# Altium footprint library Module.PcbLib: 20 footprints (part 2 of 2)
Each footprint in its own frame and in the unit in brackets; x right, y up, seen from the top. Pads: shape width x height; smd on the part's side, far side on the other; paste and mask are expansions set on the pad; w line width, h text height; cw(c..) or ccw(c..) is an arc to the next point about the centre after c.
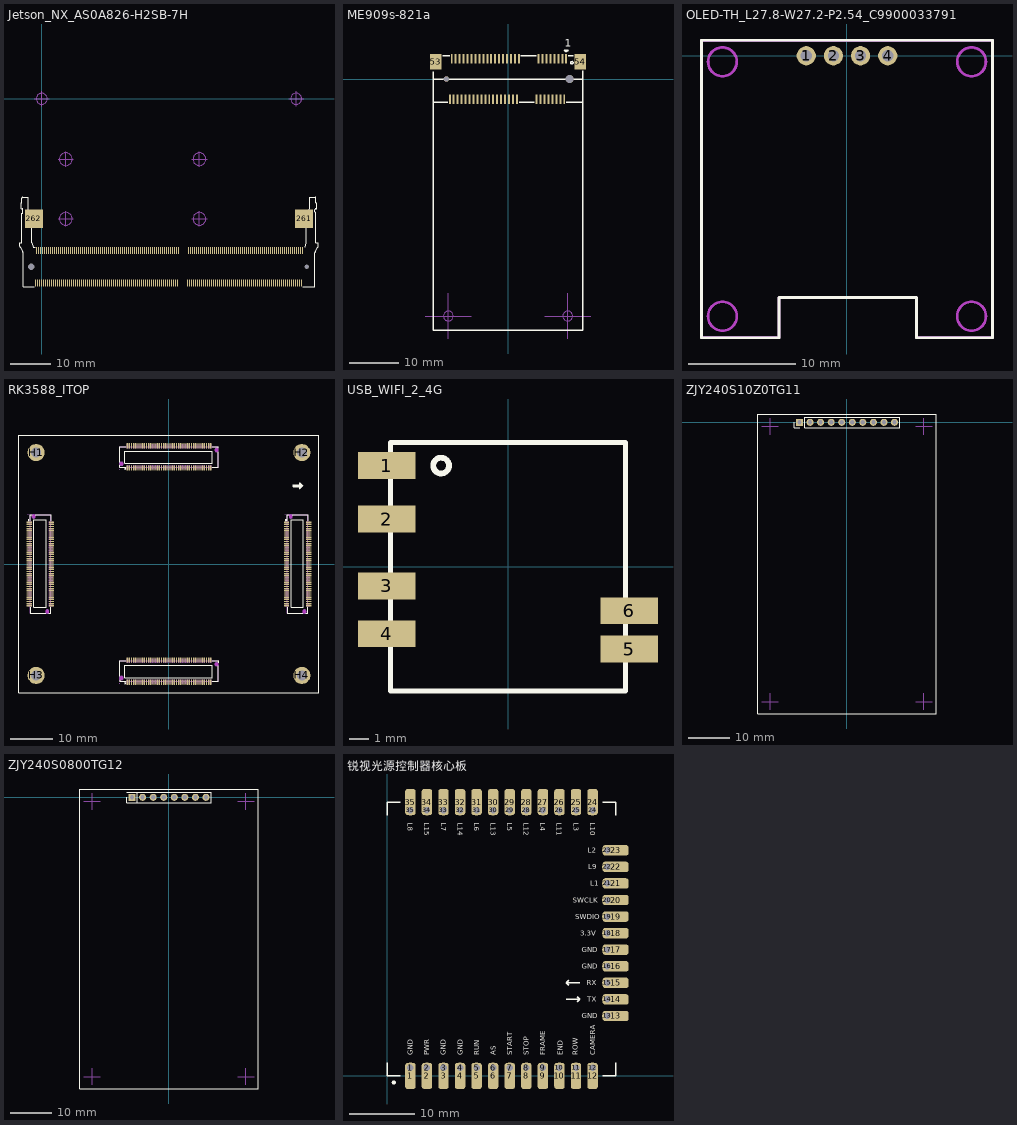
[diagram p1: the footprints below, top view; thin cyan lines are the x and y axes]

## Jetson_NX_AS0A826-H2SB-7H [mm]
pads (264):
  rect 0.3x1.75 smd paste-0.05: 1(-1.575,-46.1) 2(-1.325,-37.9) 3(-1.075,-46.1) 4(-0.825,-37.9) 5(-0.575,-46.1) 6(-0.325,-37.9) 7(-0.075,-46.1) 8(0.175,-37.9) 9(0.425,-46.1) 10(0.675,-37.9) 11(0.925,-46.1) 12(1.175,-37.9) 13(1.425,-46.1) 14(1.675,-37.9) 15(1.925,-46.1) 16(2.175,-37.9) 17(2.425,-46.1) 18(2.675,-37.9) 19(2.925,-46.1) 20(3.175,-37.9) 21(3.425,-46.1) 22(3.675,-37.9) 23(3.925,-46.1) 24(4.175,-37.9) 25(4.425,-46.1) 26(4.675,-37.9) 27(4.925,-46.1) 28(5.175,-37.9) 29(5.425,-46.1) 30(5.675,-37.9) 31(5.925,-46.1) 32(6.175,-37.9) 33(6.425,-46.1) 34(6.675,-37.9) 35(6.925,-46.1) 36(7.175,-37.9) 37(7.425,-46.1) 38(7.675,-37.9) 39(7.925,-46.1) 40(8.175,-37.9) 41(8.425,-46.1) 42(8.675,-37.9) 43(8.925,-46.1) 44(9.175,-37.9) 45(9.425,-46.1) 46(9.675,-37.9) 47(9.925,-46.1) 48(10.175,-37.9) 49(10.425,-46.1) 50(10.675,-37.9) 51(10.925,-46.1) 52(11.175,-37.9) 53(11.425,-46.1) 54(11.675,-37.9) 55(11.925,-46.1) 56(12.175,-37.9) 57(12.425,-46.1) 58(12.675,-37.9) 59(12.925,-46.1) 60(13.175,-37.9) 61(13.425,-46.1) 62(13.675,-37.9) 63(13.925,-46.1) 64(14.175,-37.9) 65(14.425,-46.1) 66(14.675,-37.9) 67(14.925,-46.1) 68(15.175,-37.9) 69(15.425,-46.1) 70(15.675,-37.9) 71(15.925,-46.1) 72(16.175,-37.9) 73(16.425,-46.1) 74(16.675,-37.9) 75(16.925,-46.1) 76(17.175,-37.9) 77(17.425,-46.1) 78(17.675,-37.9) 79(17.925,-46.1) 80(18.175,-37.9) 81(18.425,-46.1) 82(18.675,-37.9) 83(18.925,-46.1) 84(19.175,-37.9) 85(19.425,-46.1) 86(19.675,-37.9) 87(19.925,-46.1) 88(20.175,-37.9) 89(20.425,-46.1) 90(20.675,-37.9) 91(20.925,-46.1) 92(21.175,-37.9) 93(21.425,-46.1) 94(21.675,-37.9) 95(21.925,-46.1) 96(22.175,-37.9) 97(22.425,-46.1) 98(22.675,-37.9) 99(22.925,-46.1) 100(23.175,-37.9) 101(23.425,-46.1) 102(23.675,-37.9) 103(23.925,-46.1) 104(24.175,-37.9) 105(24.425,-46.1) 106(24.675,-37.9) 107(24.925,-46.1) 108(25.175,-37.9) 109(25.425,-46.1) 110(25.675,-37.9) 111(25.925,-46.1) 112(26.175,-37.9) 113(26.425,-46.1) 114(26.675,-37.9) 115(26.925,-46.1) 116(27.175,-37.9) 117(27.425,-46.1) 118(27.675,-37.9) 119(27.925,-46.1) 120(28.175,-37.9) 121(28.425,-46.1) 122(28.675,-37.9) 123(28.925,-46.1) 124(29.175,-37.9) 125(29.425,-46.1) 126(29.675,-37.9) 127(29.925,-46.1) 128(30.175,-37.9) 129(30.425,-46.1) 130(30.675,-37.9) 131(30.925,-46.1) 132(31.175,-37.9) 133(31.425,-46.1) 134(31.675,-37.9) 135(31.925,-46.1) 136(32.175,-37.9) 137(32.425,-46.1) 138(32.675,-37.9) 139(32.925,-46.1) 140(33.175,-37.9) 141(33.425,-46.1) 142(33.675,-37.9) 143(33.925,-46.1) 144(34.175,-37.9) 145(36.425,-46.1) 146(36.675,-37.9) 147(36.925,-46.1) 148(37.175,-37.9) 149(37.425,-46.1) 150(37.675,-37.9) 151(37.925,-46.1) 152(38.175,-37.9) 153(38.425,-46.1) 154(38.675,-37.9) 155(38.925,-46.1) 156(39.175,-37.9) 157(39.425,-46.1) 158(39.675,-37.9) 159(39.925,-46.1) 160(40.175,-37.9) 161(40.425,-46.1) 162(40.675,-37.9) 163(40.925,-46.1) 164(41.175,-37.9) 165(41.425,-46.1) 166(41.675,-37.9) 167(41.925,-46.1) 168(42.175,-37.9) 169(42.425,-46.1) 170(42.675,-37.9) 171(42.925,-46.1) 172(43.175,-37.9) 173(43.425,-46.1) 174(43.675,-37.9) 175(43.925,-46.1) 176(44.175,-37.9) 177(44.425,-46.1) 178(44.675,-37.9) 179(44.925,-46.1) 180(45.175,-37.9) 181(45.425,-46.1) 182(45.675,-37.9) 183(45.925,-46.1) 184(46.175,-37.9) 185(46.425,-46.1) 186(46.675,-37.9) 187(46.925,-46.1) 188(47.175,-37.9) 189(47.425,-46.1) 190(47.675,-37.9) 191(47.925,-46.1) 192(48.175,-37.9) 193(48.425,-46.1) 194(48.675,-37.9) 195(48.925,-46.1) 196(49.175,-37.9) 197(49.425,-46.1) 198(49.675,-37.9) 199(49.925,-46.1) 200(50.175,-37.9) 201(50.425,-46.1) 202(50.675,-37.9) 203(50.925,-46.1) 204(51.175,-37.9) 205(51.425,-46.1) 206(51.675,-37.9) 207(51.925,-46.1) 208(52.175,-37.9) 209(52.425,-46.1) 210(52.675,-37.9) 211(52.925,-46.1) 212(53.175,-37.9) 213(53.425,-46.1) 214(53.675,-37.9) 215(53.925,-46.1) 216(54.175,-37.9) 217(54.425,-46.1) 218(54.675,-37.9) 219(54.925,-46.1) 220(55.175,-37.9) 221(55.425,-46.1) 222(55.675,-37.9) 223(55.925,-46.1) 224(56.175,-37.9) 225(56.425,-46.1) 226(56.675,-37.9) 227(56.925,-46.1) 228(57.175,-37.9) 229(57.425,-46.1) 230(57.675,-37.9) 231(57.925,-46.1) 232(58.175,-37.9) 233(58.425,-46.1) 234(58.675,-37.9) 235(58.925,-46.1) 236(59.175,-37.9) 237(59.425,-46.1) 238(59.675,-37.9) 239(59.925,-46.1) 240(60.175,-37.9) 241(60.425,-46.1) 242(60.675,-37.9) 243(60.925,-46.1) 244(61.175,-37.9) 245(61.425,-46.1) 246(61.675,-37.9) 247(61.925,-46.1) 248(62.175,-37.9) 249(62.425,-46.1) 250(62.675,-37.9) 251(62.925,-46.1) 252(63.175,-37.9) 253(63.425,-46.1) 254(63.675,-37.9) 255(63.925,-46.1) 256(64.175,-37.9) 257(64.425,-46.1) 258(64.675,-37.9) 259(64.925,-46.1) 260(65.175,-37.9)
  rect 4.5x4.6 smd paste-0.05: 261(65.6,-30) 262(-2,-30)
  round 0 hole 1.6 unplated: M(-2.6,-42)
  round 0 hole 1.1 unplated: M(66.2,-42)
Top Overlay:
  lines w0.1: -4.954,-28.6 -4.954,-36 -5.5,-36.05 ; -4.878,-28.6 ccw(c-4.878,-28.45) -4.728,-28.45 -4.728,-27.667 ccw(c-4.878,-27.667) -4.878,-27.517 -5.127,-27.517 -5.127,-26.028 -4.978,-26.028 -4.978,-24.813 cw(c-4.778,-24.813) -4.778,-24.613 -3.871,-24.613 -3.871,-24.61 -3.371,-24.61 -3.371,-28.128 -2.5,-31.166 -2.5,-36.05 -2.15,-37.15 -1.65,-37.15 ; 65.85,-37.15 66.1,-36.05 ; -5.5,-36.813 ccw(c-5,-36.813) -5.43,-37.068 ; -5.5,-36.813 ccw(c-5,-36.813) -5.43,-37.068 ; -5.5,-36.813 -5.5,-36.05 ; -5.5,-36.813 -5.5,-36.05 ; -5.43,-37.068 -4.77,-38.182 ; -5.43,-37.068 -4.77,-38.182 ; -4.77,-38.182 cw(c-5.2,-38.437) -4.7,-38.437 ; -4.77,-38.182 cw(c-5.2,-38.437) -4.7,-38.437 ; -4.7,-47 -4.7,-38.437 ; -4.7,-47 -4.7,-38.437 ; -4.7,-47 -1.95,-47 -4.7,-47 ; 66.1,-36.05 66.1,-30.318 ; 66.1,-36.05 66.1,-30.318 ; 66.1,-30.318 66.98,-27.318 66.98,-24.595 67.59,-24.595 ccw(c67.63,-24.45) 67.63,-24.6 68.35,-24.6 cw(c68.35,-24.8) 68.55,-24.8 68.55,-26 68.736,-26 68.736,-27.5 68.5,-27.5 ccw(c68.5,-27.7) 68.3,-27.7 68.3,-28.3 ccw(c68.5,-28.3) 68.5,-28.5 68.545,-28.5 68.545,-36 69.1,-36.05 ; 68.3,-47 68.3,-38.437 ; 68.3,-47 65.3,-47 68.3,-47 ; 68.3,-47 68.3,-38.437 ; 68.3,-38.437 cw(c68.8,-38.437) 68.37,-38.182 ; 68.3,-38.437 cw(c68.8,-38.437) 68.37,-38.182 ; 68.37,-38.182 69.03,-37.068 ; 68.37,-38.182 69.03,-37.068 ; 69.03,-37.068 ccw(c68.6,-36.813) 69.1,-36.813 ; 69.03,-37.068 ccw(c68.6,-36.813) 69.1,-36.813 ; 69.1,-36.813 69.1,-36.05 ; 69.1,-36.813 69.1,-36.05
Mechanical 3:
  circle w0.1: c0,0 r1.375
  circle w0.1: c5.987,-30.002 r1.6
  circle w0.1: c5.987,-15.098 r1.6
  circle w0.1: c39.413,-15.098 r1.6
  circle w0.1: c39.413,-30.002 r1.6
  circle w0.1: c63.6,0 r1.375
  lines w0.1: -1.9,0 0,0 ; 0,-1.9 0,0 ; 0,1.9 0,0 ; 1.9,0 0,0 ; 4.094,-29.997 5.994,-29.997 ; 4.094,-15.088 5.994,-15.088 ; 5.994,-31.897 5.994,-29.997 ; 5.994,-28.097 5.994,-29.997 ; 5.994,-16.988 5.994,-15.088 ; 5.994,-13.188 5.994,-15.088 ; 7.894,-29.997 5.994,-29.997 ; 7.894,-15.088 5.994,-15.088 ; 37.521,-29.997 39.421,-29.997 ; 37.521,-15.113 39.421,-15.113 ; 39.421,-31.897 39.421,-29.997 ; 39.421,-28.097 39.421,-29.997 ; 39.421,-17.013 39.421,-15.113 ; 39.421,-13.213 39.421,-15.113 ; 41.321,-29.997 39.421,-29.997 ; 41.321,-15.113 39.421,-15.113 ; 61.702,0 63.602,0 ; 63.602,-1.9 63.602,0 ; 63.602,1.9 63.602,0 ; 65.502,0 63.602,0
  text "module mounting holes placement taken from 3D models" at 12.125,-0.125 h0.76
  text "its real position may differ" at 21.15,-1.2 h0.76
3D body "CONN-SMD_260P-P0.50_AS0A821-H4SB-7H.stp": height 4.29, standoff -0.59, extent -4.873,-46.775 68.427,-21.075

## ME909s-821a [mm]
pads (56):
  rect 0.4x2 smd: 1(11.8,4.1) 2(11.4,-4.1) 3(11,4.1) 4(10.6,-4.1) 5(10.2,4.1) 6(9.8,-4.1) 7(9.4,4.1) 8(9,-4.1) 9(8.6,4.1) 10(8.2,-4.1) 11(7.8,4.1) 12(7.4,-4.1) 13(7,4.1) 14(6.6,-4.1) 15(6.2,4.1) 16(5.8,-4.1) 17(2.2,4.1) 18(1.8,-4.1) 19(1.4,4.1) 20(1,-4.1) 21(0.6,4.1) 22(0.2,-4.1) 23(-0.2,4.1) 24(-0.6,-4.1) 25(-1,4.1) 26(-1.4,-4.1) 27(-1.8,4.1) 28(-2.2,-4.1) 29(-2.6,4.1) 30(-3,-4.1) 31(-3.4,4.1) 32(-3.8,-4.1) 33(-4.2,4.1) 34(-4.6,-4.1) 35(-5,4.1) 36(-5.4,-4.1) 37(-5.8,4.1) 38(-6.2,-4.1) 39(-6.6,4.1) 40(-7,-4.1) 41(-7.4,4.1) 42(-7.8,-4.1) 43(-8.2,4.1) 44(-8.6,-4.1) 45(-9,4.1) 46(-9.4,-4.1) 47(-9.8,4.1) 48(-10.2,-4.1) 49(-10.6,4.1) 50(-11,-4.1) 51(-11.4,4.1) 52(-11.8,-4.1)
  rect 2.3x3.2 smd: 53(-14.65,3.5) 54(14.65,3.5)
  round 1.1 hole 1.1 unplated: ""(-12.5,0)
  round 1.6 hole 1.6 unplated: ""(12.5,0)
Top Overlay:
  circle w0.254: c12.954,3.302 r0.254
  lines w0.254: -15.113,1.524 -15.113,-4.699 -12.231,-4.699 ; -13.208,4.699 -11.831,4.699 ; 2.231,-4.699 5.369,-4.699 ; 2.631,4.699 5.769,4.699 ; 11.831,-4.699 15.113,-4.699 15.113,1.651 ; 12.231,4.699 13.208,4.699 ; -15.2,-50.95 -15.2,0 15.2,0 15.2,-50.95 -15.2,-50.95 ; 11.419,5.878 11.8,5.497 12.181,5.878 11.8,5.878 11.419,5.878
  text "1" at 11.546,6.589 h1.52
Mechanical 15:
  circle w0.152: c-12.1,-48.05 r1
  circle w0.152: c12.1,-48.05 r1
  lines w0.152: -16.75,-48.05 -12.1,-48.05 ; -12.1,-52.7 -12.1,-48.05 ; -12.1,-43.4 -12.1,-48.05 ; -7.45,-48.05 -12.1,-48.05 ; 7.45,-48.05 12.1,-48.05 ; 12.1,-52.7 12.1,-48.05 ; 12.1,-43.4 12.1,-48.05 ; 16.75,-48.05 12.1,-48.05

## OLED-TH_L27.8-W27.2-P2.54_C9900033791 [mm]
pads (4):
  round 1.801 hole 1.049 paste+0 mask+0.051: 1(-3.81,0) 2(-1.27,0) 3(1.27,0) 4(3.81,0)
Top Overlay:
  lines w0.254: -13.599,-26.36 -13.599,1.44 13.599,1.44 13.599,-26.36 6.5,-26.36 6.5,-22.609 -6.35,-22.609 -6.35,-26.36 -13.599,-26.36
Keep-Out Layer:
  circle w0.254: c-11.65,-0.56 r1.35
  circle w0.254: c11.65,-0.56 r1.35
  circle w0.254: c-11.65,-24.36 r1.35
  circle w0.254: c11.65,-24.36 r1.35
  lines w0.003: -12.898,-0.561 -12.89,-0.404 -12.86,-0.249 -12.812,-0.099 -12.746,0.043 -12.659,0.175 -12.56,0.295 -12.446,0.404 -12.319,0.495 -12.182,0.572 -12.035,0.627 -11.882,0.668 -11.727,0.688 -11.57,0.688 -11.415,0.668 -11.262,0.627 -11.118,0.572 -10.98,0.495 -10.853,0.404 -10.739,0.295 -10.638,0.175 -10.554,0.043 -10.488,-0.099 -10.439,-0.249 -10.409,-0.404 -10.399,-0.561 -10.409,-0.716 -10.439,-0.871 -10.488,-1.021 -10.554,-1.163 -10.638,-1.295 -10.739,-1.415 -10.853,-1.524 -10.98,-1.615 -11.118,-1.692 -11.262,-1.75 -11.415,-1.788 -11.57,-1.808 -11.727,-1.808 -11.882,-1.788 -12.035,-1.75 -12.182,-1.692 -12.319,-1.615 -12.446,-1.524 -12.56,-1.415 -12.659,-1.295 -12.746,-1.163 -12.812,-1.021 -12.86,-0.871 -12.89,-0.716 -12.898,-0.561 ; 10.399,-0.561 10.409,-0.716 10.439,-0.871 10.488,-1.021 10.554,-1.163 10.638,-1.295 10.739,-1.415 10.853,-1.524 10.98,-1.615 11.118,-1.692 11.262,-1.75 11.415,-1.788 11.57,-1.808 11.727,-1.808 11.882,-1.788 12.035,-1.75 12.182,-1.692 12.319,-1.615 12.446,-1.524 12.56,-1.415 12.659,-1.295 12.746,-1.163 12.812,-1.021 12.86,-0.871 12.89,-0.716 12.898,-0.561 12.89,-0.404 12.86,-0.249 12.812,-0.099 12.746,0.043 12.659,0.175 12.56,0.295 12.446,0.404 12.319,0.495 12.182,0.572 12.035,0.627 11.882,0.668 11.727,0.688 11.57,0.688 11.415,0.668 11.262,0.627 11.118,0.572 10.98,0.495 10.853,0.404 10.739,0.295 10.638,0.175 10.554,0.043 10.488,-0.099 10.439,-0.249 10.409,-0.404 10.399,-0.561
Mechanical 1:
  circle w0.254: c-11.65,-0.56 r1.35
  circle w0.254: c11.65,-0.56 r1.35
  circle w0.254: c-11.65,-24.36 r1.35
  circle w0.254: c11.65,-24.36 r1.35
Mechanical 4:
  region: 13.602,1.313 -13.599,1.313 -13.647,1.323 -13.688,1.351 -13.716,1.392 -13.726,1.44 -13.716,1.488 -13.688,1.529 -13.647,1.557 -13.599,1.567 13.602,1.567 13.65,1.557 13.691,1.529 13.719,1.488 13.729,1.44 13.719,1.392 13.691,1.351 13.65,1.323
  region: 6.5,-26.487 6.452,-26.477 6.411,-26.449 6.383,-26.408 6.373,-26.36 6.373,-22.738 -6.223,-22.738 -6.223,-26.36 -6.231,-26.408 -6.259,-26.449 -6.302,-26.477 -6.35,-26.487 -13.599,-26.487 -13.647,-26.477 -13.688,-26.449 -13.716,-26.408 -13.726,-26.36 -13.726,1.44 -13.716,1.488 -13.688,1.529 -13.647,1.557 -13.599,1.567 -13.551,1.557 -13.51,1.529 -13.482,1.488 -13.472,1.44 -13.472,-26.233 -6.477,-26.233 -6.477,-22.611 -6.467,-22.56 -6.439,-22.52 -6.398,-22.492 -6.35,-22.484 6.5,-22.484 6.551,-22.492 6.591,-22.52 6.619,-22.56 6.627,-22.611 6.627,-26.233 13.475,-26.233 13.475,1.44 13.482,1.488 13.51,1.529 13.553,1.557 13.602,1.567 13.65,1.557 13.691,1.529 13.719,1.488 13.729,1.44 13.729,-26.36 13.719,-26.408 13.691,-26.449 13.65,-26.477 13.602,-26.487
Top 3D Body:
  lines w0.051: -13.599,-26.36 -13.599,1.44 13.599,1.44 13.599,-26.36 6.5,-26.36 6.5,-22.609 -6.35,-22.609 -6.35,-26.36 -13.599,-26.36
Mechanical 10:
  region: -4.13,0.32 -3.49,0.32 -3.49,-0.32 -4.13,-0.32
  region: -1.59,0.32 -0.95,0.32 -0.95,-0.32 -1.59,-0.32
  region: 0.95,0.32 1.59,0.32 1.59,-0.32 0.95,-0.32
  region: 3.49,0.32 4.13,0.32 4.13,-0.32 3.49,-0.32
Multi-Layer:
  pour cut-out: -11.65,-1.91 -11.783,-1.91 -12.044,-1.858 -12.289,-1.756 -12.511,-1.609 -12.699,-1.421 -12.846,-1.199 -12.948,-0.954 -13,-0.693 -13,-0.56 -13,-0.427 -12.948,-0.166 -12.846,0.079 -12.699,0.301 -12.511,0.489 -12.289,0.636 -12.044,0.738 -11.783,0.79 -11.65,0.79 -11.517,0.79 -11.256,0.738 -11.011,0.636 -10.789,0.489 -10.601,0.301 -10.454,0.079 -10.352,-0.166 -10.3,-0.427 -10.3,-0.56 -10.3,-0.693 -10.352,-0.954 -10.454,-1.199 -10.601,-1.421 -10.789,-1.609 -11.011,-1.756 -11.256,-1.858 -11.517,-1.91
  pour cut-out: 11.65,-1.91 11.783,-1.91 12.044,-1.858 12.289,-1.756 12.511,-1.609 12.699,-1.421 12.846,-1.199 12.948,-0.954 13,-0.693 13,-0.56 13,-0.427 12.948,-0.166 12.846,0.079 12.699,0.301 12.511,0.489 12.289,0.636 12.044,0.738 11.783,0.79 11.65,0.79 11.517,0.79 11.256,0.738 11.011,0.636 10.789,0.489 10.601,0.301 10.454,0.079 10.352,-0.166 10.3,-0.427 10.3,-0.56 10.3,-0.693 10.352,-0.954 10.454,-1.199 10.601,-1.421 10.789,-1.609 11.011,-1.756 11.256,-1.858 11.517,-1.91
  pour cut-out: -13,-24.36 -13,-24.493 -12.948,-24.754 -12.846,-24.999 -12.699,-25.221 -12.511,-25.409 -12.289,-25.556 -12.044,-25.658 -11.783,-25.71 -11.65,-25.71 -11.517,-25.71 -11.256,-25.658 -11.011,-25.556 -10.789,-25.409 -10.601,-25.221 -10.454,-24.999 -10.352,-24.754 -10.3,-24.493 -10.3,-24.36 -10.3,-24.227 -10.352,-23.966 -10.454,-23.721 -10.601,-23.499 -10.789,-23.311 -11.011,-23.164 -11.256,-23.062 -11.517,-23.01 -11.65,-23.01 -11.783,-23.01 -12.044,-23.062 -12.289,-23.164 -12.511,-23.311 -12.699,-23.499 -12.846,-23.721 -12.948,-23.966 -13,-24.227
  pour cut-out: 13,-24.36 13,-24.493 12.948,-24.754 12.846,-24.999 12.699,-25.221 12.511,-25.409 12.289,-25.556 12.044,-25.658 11.783,-25.71 11.65,-25.71 11.517,-25.71 11.256,-25.658 11.011,-25.556 10.789,-25.409 10.601,-25.221 10.454,-24.999 10.352,-24.754 10.3,-24.493 10.3,-24.36 10.3,-24.227 10.352,-23.966 10.454,-23.721 10.601,-23.499 10.789,-23.311 11.011,-23.164 11.256,-23.062 11.517,-23.01 11.65,-23.01 11.783,-23.01 12.044,-23.062 12.289,-23.164 12.511,-23.311 12.699,-23.499 12.846,-23.721 12.948,-23.966 13,-24.227
3D body "11.step": height 5.5, standoff 2.38, extent -13.6,-26.371 13.6,1.429

## RK3588_ITOP [mm]
pads (324):
  rect 0.3x1.2 smd: D1(-9.75,-27.6) D2(-9.75,-22.4) D3(-9.25,-27.6) D4(-9.25,-22.4) D5(-8.75,-27.6) D6(-8.75,-22.4) D7(-8.25,-27.6) D8(-8.25,-22.4) D9(-7.75,-27.6) D10(-7.75,-22.4) D11(-7.25,-27.6) D12(-7.25,-22.4) D13(-6.75,-27.6) D14(-6.75,-22.4) D15(-6.25,-27.6) D16(-6.25,-22.4) D17(-5.75,-27.6) D18(-5.75,-22.4) D19(-5.25,-27.6) D20(-5.25,-22.4) D21(-4.75,-27.6) D22(-4.75,-22.4) D23(-4.25,-27.6) D24(-4.25,-22.4) D25(-3.75,-27.6) D26(-3.75,-22.4) D27(-3.25,-27.6) D28(-3.25,-22.4) D29(-2.75,-27.6) D30(-2.75,-22.4) D31(-2.25,-27.6) D32(-2.25,-22.4) D33(-1.75,-27.6) D34(-1.75,-22.4) D35(-1.25,-27.6) D36(-1.25,-22.4) D37(-0.75,-27.6) D38(-0.75,-22.4) D39(-0.25,-27.6) D40(-0.25,-22.4) D41(0.25,-27.6) D42(0.25,-22.4) D43(0.75,-27.6) D44(0.75,-22.4) D45(1.25,-27.6) D46(1.25,-22.4) D47(1.75,-27.6) D48(1.75,-22.4) D49(2.25,-27.6) D50(2.25,-22.4) D51(2.75,-27.6) D52(2.75,-22.4) D53(3.25,-27.6) D54(3.25,-22.4) D55(3.75,-27.6) D56(3.75,-22.4) D57(4.25,-27.6) D58(4.25,-22.4) D59(4.75,-27.6) D60(4.75,-22.4) D61(5.25,-27.6) D62(5.25,-22.4) D63(5.75,-27.6) D64(5.75,-22.4) D65(6.25,-27.6) D66(6.25,-22.4) D67(6.75,-27.6) D68(6.75,-22.4) D69(7.25,-27.6) D70(7.25,-22.4) D71(7.75,-27.6) D72(7.75,-22.4) D73(8.25,-27.6) D74(8.25,-22.4) D75(8.75,-27.6) D76(8.75,-22.4) D77(9.25,-27.6) D78(9.25,-22.4) D79(9.75,-27.6) D80(9.75,-22.4) U1(-9.75,22.4) U2(-9.75,27.6) U3(-9.25,22.4) U4(-9.25,27.6) U5(-8.75,22.4) U6(-8.75,27.6) U7(-8.25,22.4) U8(-8.25,27.6) U9(-7.75,22.4) U10(-7.75,27.6) U11(-7.25,22.4) U12(-7.25,27.6) U13(-6.75,22.4) U14(-6.75,27.6) U15(-6.25,22.4) U16(-6.25,27.6) U17(-5.75,22.4) U18(-5.75,27.6) U19(-5.25,22.4) U20(-5.25,27.6) U21(-4.75,22.4) U22(-4.75,27.6) U23(-4.25,22.4) U24(-4.25,27.6) U25(-3.75,22.4) U26(-3.75,27.6) U27(-3.25,22.4) U28(-3.25,27.6) U29(-2.75,22.4) U30(-2.75,27.6) U31(-2.25,22.4) U32(-2.25,27.6) U33(-1.75,22.4) U34(-1.75,27.6) U35(-1.25,22.4) U36(-1.25,27.6) U37(-0.75,22.4) U38(-0.75,27.6) U39(-0.25,22.4) U40(-0.25,27.6) U41(0.25,22.4) U42(0.25,27.6) U43(0.75,22.4) U44(0.75,27.6) U45(1.25,22.4) U46(1.25,27.6) U47(1.75,22.4) U48(1.75,27.6) U49(2.25,22.4) U50(2.25,27.6) U51(2.75,22.4) U52(2.75,27.6) U53(3.25,22.4) U54(3.25,27.6) U55(3.75,22.4) U56(3.75,27.6) U57(4.25,22.4) U58(4.25,27.6) U59(4.75,22.4) U60(4.75,27.6) U61(5.25,22.4) U62(5.25,27.6) U63(5.75,22.4) U64(5.75,27.6) U65(6.25,22.4) U66(6.25,27.6) U67(6.75,22.4) U68(6.75,27.6) U69(7.25,22.4) U70(7.25,27.6) U71(7.75,22.4) U72(7.75,27.6) U73(8.25,22.4) U74(8.25,27.6) U75(8.75,22.4) U76(8.75,27.6) U77(9.25,22.4) U78(9.25,27.6) U79(9.75,22.4) U80(9.75,27.6)
  round 4 hole 2.3: H1(-31,26) H2(31,26) H3(-31,-26) H4(31,-26)
  rect 1.2x0.3 smd: L1(-32.6,9.75) L2(-27.4,9.75) L3(-32.6,9.25) L4(-27.4,9.25) L5(-32.6,8.75) L6(-27.4,8.75) L7(-32.6,8.25) L8(-27.4,8.25) L9(-32.6,7.75) L10(-27.4,7.75) L11(-32.6,7.25) L12(-27.4,7.25) L13(-32.6,6.75) L14(-27.4,6.75) L15(-32.6,6.25) L16(-27.4,6.25) L17(-32.6,5.75) L18(-27.4,5.75) L19(-32.6,5.25) L20(-27.4,5.25) L21(-32.6,4.75) L22(-27.4,4.75) L23(-32.6,4.25) L24(-27.4,4.25) L25(-32.6,3.75) L26(-27.4,3.75) L27(-32.6,3.25) L28(-27.4,3.25) L29(-32.6,2.75) L30(-27.4,2.75) L31(-32.6,2.25) L32(-27.4,2.25) L33(-32.6,1.75) L34(-27.4,1.75) L35(-32.6,1.25) L36(-27.4,1.25) L37(-32.6,0.75) L38(-27.4,0.75) L39(-32.6,0.25) L40(-27.4,0.25) L41(-32.6,-0.25) L42(-27.4,-0.25) L43(-32.6,-0.75) L44(-27.4,-0.75) L45(-32.6,-1.25) L46(-27.4,-1.25) L47(-32.6,-1.75) L48(-27.4,-1.75) L49(-32.6,-2.25) L50(-27.4,-2.25) L51(-32.6,-2.75) L52(-27.4,-2.75) L53(-32.6,-3.25) L54(-27.4,-3.25) L55(-32.6,-3.75) L56(-27.4,-3.75) L57(-32.6,-4.25) L58(-27.4,-4.25) L59(-32.6,-4.75) L60(-27.4,-4.75) L61(-32.6,-5.25) L62(-27.4,-5.25) L63(-32.6,-5.75) L64(-27.4,-5.75) L65(-32.6,-6.25) L66(-27.4,-6.25) L67(-32.6,-6.75) L68(-27.4,-6.75) L69(-32.6,-7.25) L70(-27.4,-7.25) L71(-32.6,-7.75) L72(-27.4,-7.75) L73(-32.6,-8.25) L74(-27.4,-8.25) L75(-32.6,-8.75) L76(-27.4,-8.75) L77(-32.6,-9.25) L78(-27.4,-9.25) L79(-32.6,-9.75) L80(-27.4,-9.75) R1(27.4,9.75) R2(32.6,9.75) R3(27.4,9.25) R4(32.6,9.25) R5(27.4,8.75) R6(32.6,8.75) R7(27.4,8.25) R8(32.6,8.25) R9(27.4,7.75) R10(32.6,7.75) R11(27.4,7.25) R12(32.6,7.25) R13(27.4,6.75) R14(32.6,6.75) R15(27.4,6.25) R16(32.6,6.25) R17(27.4,5.75) R18(32.6,5.75) R19(27.4,5.25) R20(32.6,5.25) R21(27.4,4.75) R22(32.6,4.75) R23(27.4,4.25) R24(32.6,4.25) R25(27.4,3.75) R26(32.6,3.75) R27(27.4,3.25) R28(32.6,3.25) R29(27.4,2.75) R30(32.6,2.75) R31(27.4,2.25) R32(32.6,2.25) R33(27.4,1.75) R34(32.6,1.75) R35(27.4,1.25) R36(32.6,1.25) R37(27.4,0.75) R38(32.6,0.75) R39(27.4,0.25) R40(32.6,0.25) R41(27.4,-0.25) R42(32.6,-0.25) R43(27.4,-0.75) R44(32.6,-0.75) R45(27.4,-1.25) R46(32.6,-1.25) R47(27.4,-1.75) R48(32.6,-1.75) R49(27.4,-2.25) R50(32.6,-2.25) R51(27.4,-2.75) R52(32.6,-2.75) R53(27.4,-3.25) R54(32.6,-3.25) R55(27.4,-3.75) R56(32.6,-3.75) R57(27.4,-4.25) R58(32.6,-4.25) R59(27.4,-4.75) R60(32.6,-4.75) R61(27.4,-5.25) R62(32.6,-5.25) R63(27.4,-5.75) R64(32.6,-5.75) R65(27.4,-6.25) R66(32.6,-6.25) R67(27.4,-6.75) R68(32.6,-6.75) R69(27.4,-7.25) R70(32.6,-7.25) R71(27.4,-7.75) R72(32.6,-7.75) R73(27.4,-8.25) R74(32.6,-8.25) R75(27.4,-8.75) R76(32.6,-8.75) R77(27.4,-9.25) R78(32.6,-9.25) R79(27.4,-9.75) R80(32.6,-9.75)
Top Overlay:
  circle w0.2: c-10.247,-27.794 r0.1
  circle w0.2: c27.206,10.247 r0.1
  circle w0.2: c-32.794,10.247 r0.1
  circle w0.2: c-10.247,22.206 r0.1
  region: 29,18 29,18.5 30.5,18.5 30.5,19 31.25,18.25 30.5,17.5 30.5,18
  lines w0.127: 29,18 30.5,18 30.5,17.5 31.25,18.25 30.5,19 30.5,18.5 29,18.5 29,18
  lines w0.152: -32.4,-10.131 -32.4,-11.5 -28.765,-11.5 ; -32.4,10.131 -32.4,11.5 -31.965,11.5 ; -31.235,11.5 -27.6,11.5 -27.6,10.131 ; -28.035,-11.5 -27.6,-11.5 -27.6,-10.131 ; -11.5,-26.965 -11.5,-27.4 -10.131,-27.4 ; -11.5,-26.235 -11.5,-22.6 -10.131,-22.6 ; -11.5,23.035 -11.5,22.6 -10.131,22.6 ; -11.5,23.765 -11.5,27.4 -10.131,27.4 ; 10.131,-27.4 11.5,-27.4 11.5,-23.765 ; 10.131,-22.6 11.5,-22.6 11.5,-23.035 ; 10.131,22.6 11.5,22.6 11.5,26.235 ; 10.131,27.4 11.5,27.4 11.5,26.965 ; 27.6,-10.131 27.6,-11.5 31.235,-11.5 ; 27.6,10.131 27.6,11.5 28.035,11.5 ; 28.765,11.5 32.4,11.5 32.4,10.131 ; 31.965,-11.5 32.4,-11.5 32.4,-10.131 ; -35,-30 -35,30 35,30 35,-30 -35,-30 ; -31.524,-10.073 -31.524,10.31 -28.667,10.31 -28.667,-10.073 -31.524,-10.073 ; -10.31,-26.524 10.073,-26.524 10.073,-23.667 -10.31,-23.667 -10.31,-26.524 ; -10.31,23.476 10.073,23.476 10.073,26.334 -10.31,26.334 -10.31,23.476 ; 28.476,-10.073 28.476,10.31 31.334,10.31 31.334,-10.073 28.476,-10.073
Keep-Out Layer:
  drawing of 8 lines, arcs and shapes, not listed
Mechanical 1:
  circle w0.005: c-11.1,-26.6 r0.4
  circle w0.005: c11.1,-23.4 r0.4
  circle w0.005: c28.4,11.1 r0.4
  circle w0.005: c31.6,-11.1 r0.4
  circle w0.005: c-31.6,11.1 r0.4
  circle w0.005: c-28.4,-11.1 r0.4
  circle w0.005: c-11.1,23.4 r0.4
  circle w0.005: c11.1,26.6 r0.4
Mechanical 6:
  circle w0.34: c11.1,-23.4 r0.17
  circle w0.34: c-11.1,-26.6 r0.17
  circle w0.34: c31.6,-11.1 r0.17
  circle w0.34: c28.4,11.1 r0.17
  circle w0.34: c-28.4,-11.1 r0.17
  circle w0.34: c-31.6,11.1 r0.17
  circle w0.34: c11.1,26.6 r0.17
  circle w0.34: c-11.1,23.4 r0.17
Mechanical 15:
  drawing of 340 lines, arcs and shapes, not listed
3D body "70mc-CN1.stp": height 1.49, standoff 0, extent -11.5,-27.9 11.501,-22.1
3D body "70mc-CN1.stp": height 1.49, standoff 0, extent 27.1,-11.501 32.9,11.5
3D body "70mc-CN1.stp": height 1.49, standoff 0, extent -32.9,-11.501 -27.1,11.5
3D body "70mc-CN1.stp": height 1.49, standoff 0, extent -11.5,22.1 11.501,27.9

## USB_WIFI_2_4G [mm]
pads (6):
  rect 3x1.4 smd: 1(-6.35,5.3) 2(-6.35,2.5) 3(-6.35,-1) 4(-6.35,-3.5) 5(6.35,-4.3) 6(6.35,-2.3)
Top Overlay:
  circle w0.3: c-3.5,5.3 r0.412
  lines w0.254: -6.15,-6.5 6.15,-6.5 6.15,6.5 -6.15,6.5 -6.15,-6.5

## ZJY240S10Z0TG11 [mm]
pads (10):
  rect 1.7x1.7 hole 1: 1(-11.43,0)
  round 1.7 hole 1: 2(-8.89,0) 3(-6.35,0) 4(-3.81,0) 5(-1.27,0) 6(1.27,0) 7(3.81,0) 8(6.35,0) 9(8.89,0) 10(11.43,0)
Top Overlay:
  lines w0.152: -12.7,0 -12.7,-1.27 -11.43,-1.27 ; -10.16,-1.27 -10.16,1.27 12.7,1.27 12.7,-1.27 -10.16,-1.27
  lines w0.254: -21.5,-70.26 21.5,-70.26 21.5,2 -21.5,2 -21.5,-70.26
Mechanical 15:
  lines w0.254: -20.5,-67.26 -16.5,-67.26 ; -20.5,-1 -16.5,-1 ; -18.5,-69.26 -18.5,-65.26 ; -18.5,-3 -18.5,1 ; 16.5,-67.26 20.5,-67.26 ; 16.5,-1 20.5,-1 ; 18.5,-69.26 18.5,-65.26 ; 18.5,-3 18.5,1
3D body "PinSocket_1x10_P2.54mm_Vertical.step": height 7, standoff -3.1, extent -12.7,-1.27 12.7,1.27
3D body "ZJY240S10Z0TG11.stp": height 13.25, standoff 1.4, extent -21.5,-70.26 21.5,2

## ZJY240S0800TG12 [mm]
pads (8):
  rect 1.7x1.7 hole 1: 1(-8.89,0)
  round 1.7 hole 1: 2(-6.35,0) 3(-3.81,0) 4(-1.27,0) 5(1.27,0) 6(3.81,0) 7(6.35,0) 8(8.89,0)
Top Overlay:
  lines w0.152: -10.16,0 -10.16,-1.27 ; -10.16,1.27 10.16,1.27 10.16,-1.27 -10.16,-1.27 ; -8.89,-1.27 -10.16,-1.27 ; -7.62,-1.27 -7.62,1.27
  lines w0.254: -21.5,-70.26 21.5,-70.26 21.5,2 -21.5,2 -21.5,-70.26
Mechanical 15:
  lines w0.254: -20.5,-67.26 -16.5,-67.26 ; -20.5,-1 -16.5,-1 ; -18.5,-69.26 -18.5,-65.26 ; -18.5,-3 -18.5,1 ; 16.5,-67.26 20.5,-67.26 ; 16.5,-1 20.5,-1 ; 18.5,-69.26 18.5,-65.26 ; 18.5,-3 18.5,1
3D body "ZJY240S10Z0TG11.stp": height 13.25, standoff 1.4, extent -21.5,-70.26 21.5,2

## 锐视光源控制器核心板 [mm]
pads (70):
  rrect50% 1.6x4 smd: 1(3.53,0) 2(6.07,0) 3(8.61,0) 4(11.15,0) 5(13.69,0) 6(16.23,0) 7(18.77,0) 8(21.31,0) 9(23.85,0) 10(26.39,0) 11(28.93,0) 12(31.47,0) 24(31.47,42) 25(28.93,42) 26(26.39,42) 27(23.85,42) 28(21.31,42) 29(18.77,42) 30(16.23,42) 31(13.69,42) 32(11.15,42) 33(8.61,42) 34(6.07,42) 35(3.53,42)
  round 1.6 hole 1: 1(3.53,1.265) 2(6.07,1.265) 3(8.61,1.265) 4(11.15,1.265) 5(13.69,1.265) 6(16.23,1.265) 7(18.77,1.265) 8(21.31,1.265) 9(23.85,1.265) 10(26.39,1.265) 11(28.93,1.265) 12(31.47,1.265) 13(33.735,9.197) 14(33.735,11.737) 15(33.735,14.277) 16(33.735,16.817) 17(33.735,19.357) 18(33.735,21.897) 19(33.735,24.437) 20(33.735,26.977) 21(33.735,29.517) 22(33.735,32.057) 23(33.735,34.597) 24(31.47,40.735) 25(28.93,40.735) 26(26.39,40.735) 27(23.85,40.735) 28(21.31,40.735) 29(18.77,40.735) 30(16.23,40.735) 31(13.69,40.735) 32(11.15,40.735) 33(8.61,40.735) 34(6.07,40.735) 35(3.53,40.735)
  rrect50% 4x1.6 smd: 13(35,9.197) 14(35,11.737) 15(35,14.277) 16(35,16.817) 17(35,19.357) 18(35,21.897) 19(35,24.437) 20(35,26.977) 21(35,29.517) 22(35,32.057) 23(35,34.597)
Top Overlay:
  circle w0.254: c1,-1 r0.2
  region: 0.8,-1 0.8,-1.04 0.83,-1.113 0.887,-1.17 0.96,-1.2 1,-1.2 1.04,-1.2 1.113,-1.17 1.17,-1.113 1.2,-1.04 1.2,-1 1.2,-0.96 1.17,-0.887 1.113,-0.83 1.04,-0.8 1,-0.8 0.96,-0.8 0.887,-0.83 0.83,-0.887 0.8,-0.96
  lines w0.2: 27.432,11.737 29.464,11.737 ; 27.813,13.896 27.432,14.277 ; 27.813,14.658 27.432,14.277 ; 29.083,11.356 29.464,11.737 ; 29.083,12.118 29.464,11.737 ; 29.464,14.277 27.432,14.277
  lines w0.203: 0,2 0,0 2,0 ; 0,40 0,42 2,42 ; 33,0 35,0 35,2 ; 33,42 35,42 35,40
  text "L15" at 5.688,38.8 h0.76
  text "L14" at 10.768,38.8 h0.76
  text "L13" at 15.848,38.8 h0.76
  text "L12" at 20.928,38.8 h0.76
  text "L11" at 26.008,38.8 h0.76
  text "L10" at 31.088,38.8 h0.76
  text "L7" at 8.229,38.8 h0.76
  text "L6" at 13.309,38.8 h0.76
  text "L5" at 18.389,38.8 h0.76
  text "L4" at 23.469,38.8 h0.76
  text "L3" at 28.549,38.8 h0.76
  text "L2" at 30.759,34.216 h0.76
  text "L9" at 30.796,31.676 h0.76
  text "L1" at 31.086,29.136 h0.76
  text "L8" at 3.149,38.8 h0.76
  text "GND" at 11.532,3.2 h0.76
  text "RUN" at 14.071,3.2 h0.76
  text "GND" at 29.842,8.816 h0.76
  text "GND" at 29.842,18.976 h0.76
  text "3.3V" at 29.609,21.516 h0.76
  text "SWDIO" at 28.811,24.056 h0.76
  text "SWCLK" at 28.445,26.596 h0.76
  text "FRAME" at 24.232,3.2 h0.76
  text "PWR" at 6.452,3.2 h0.76
  text "GND" at 3.912,3.2 h0.76
  text "GND" at 8.992,3.2 h0.76
  text "AS" at 16.612,3.2 h0.76
  text "RX" at 30.6,13.896 h0.76
  text "TX" at 30.68,11.356 h0.76
  text "GND" at 29.842,16.436 h0.76
  text "CAMERA" at 31.852,3.2 h0.76
  text "START" at 19.152,3.2 h0.76
  text "ROW" at 29.185,3.2 h0.76
  text "STOP" at 21.692,3.2 h0.76
  text "END" at 26.899,3.2 h0.76
3D body "控制器模块尺寸.step": height 1.61, standoff 0.01, extent 0,0 35,42